# EAGLE library part LM358 (library demo-parts)
Dual operational amplifier
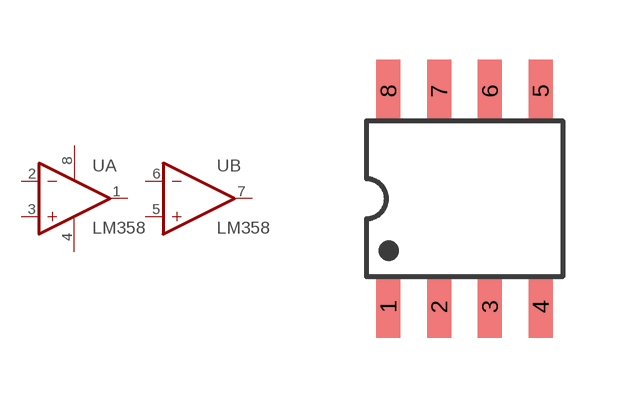
[diagram p0: symbol with the pads of SO8; footprint SO8]

Designator prefix U; gates A=OPAMP B=OPAMP P=PWR+-

## LM358D (MPN: LM358DR)  [SO8]
1  A:OUT  out
2  A:-IN  in
3  A:+IN  in
4  P:V-  pwr
5  B:+IN  in
6  B:-IN  in
7  B:OUT  out
8  P:V+  pwr

## Footprint SO8 (pad centres in mm)
SOIC-8, 3.9 x 4.9 mm body, 1.27 mm pitch
smd 0.6 x 1.55: 1 -1.905,-2.7; 2 -0.635,-2.7; 3 0.635,-2.7; 4 1.905,-2.7; 5 1.905,2.7; 6 0.635,2.7; 7 -0.635,2.7; 8 -1.905,2.7